# Altium footprint library oscillators.PcbLib: 2 footprints
Each footprint in its own frame and in the unit in brackets; x right, y up, seen from the top. Pads: shape width x height; smd on the part's side, far side on the other; paste and mask are expansions set on the pad; w line width, h text height; cw(c..) or ccw(c..) is an arc to the next point about the centre after c.
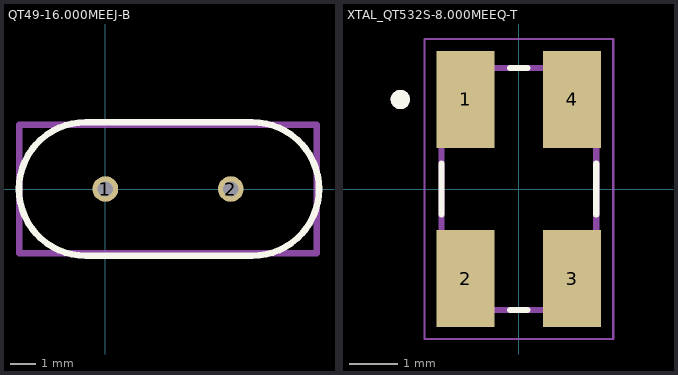
[diagram p0: the footprints below, top view; thin cyan lines are the x and y axes]

## QT49-16.000MEEJ-B [mm] "Crystal; 16MHz; THT; 11.5x5x3.68mm; 18pF; Freq.stability: ±10ppm"
pads (2):
  round 1 hole 0.6: 1(0,0) 2(4.88,0)
Top Overlay:
  lines w0.254: -0.762,-2.6 cw(c-0.762,0) -0.762,2.6 5.715,2.6 cw(c5.715,0) 5.715,-2.6 -0.762,-2.6
  text ".DESIGNATOR" at -2.967,3.063 h1
Mechanical 1:
  lines w0.254: -3.35,-2.5 8.23,-2.5 8.23,2.5 -3.35,2.5 -3.35,-2.5

## XTAL_QT532S-8.000MEEQ-T [mm]
height 1.05
pads (4):
  rect 1.2x2 smd: 1(-1.1,1.85) 2(-1.1,-1.85) 3(1.1,-1.85) 4(1.1,1.85)
Top Overlay:
  circle w0.2: c-2.45,1.85 r0.1
  lines w0.127: -1.6,-0.53 -1.6,0.53 ; -0.18,-2.5 0.18,-2.5 ; -0.18,2.5 0.18,2.5 ; 1.6,-0.53 1.6,0.53
  text ".DESIGNATOR" at 2.047,3.094 h1
Mechanical 13:
  circle w0.2: c-2.45,1.85 r0.1
  lines w0.127: -1.6,-2.5 -1.6,2.5 1.6,2.5 1.6,-2.5 -1.6,-2.5
Mechanical 15:
  lines w0.05: -1.95,-3.1 -1.95,3.1 1.95,3.1 1.95,-3.1 -1.95,-3.1
3D body "step_temp.STEP": height 1.05, standoff 0, extent -1.6,-2.5 1.6,2.5